# EAGLE library part SA612A (library madhu)
Double-balanced mixer and oscillator
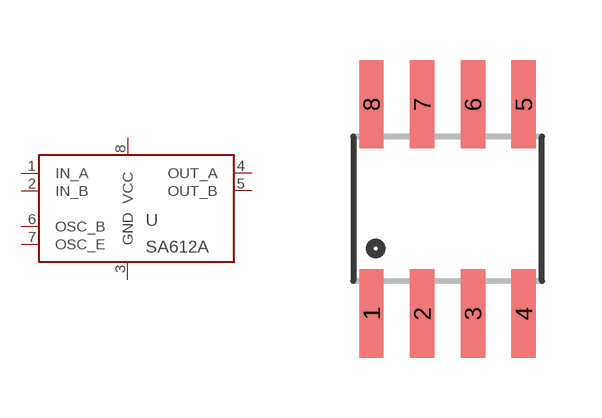
[diagram p43: symbol with the pads of SOIC-8; footprint SOIC-8]

Designator prefix U

## SA612AD  [SOIC-8]
1  IN_A  in
2  IN_B  in
3  GND  pwr
4  OUT_A  out
5  OUT_B  out
6  OSC_B  in
7  OSC_E  in
8  VCC  pwr

## Footprint SOIC-8 (pad centres in mm)
Small Outline Package Fits JEDEC packages (narrow SOIC-8)
smd 0.61 x 2.21: 1 -1.905,-2.616; 2 -0.635,-2.616; 3 0.635,-2.616; 4 1.905,-2.616; 5 1.905,2.616; 6 0.635,2.616; 7 -0.635,2.616; 8 -1.905,2.616